# Altium integrated library ABM8-25.000MHZ-B2-T.IntLib: 1 symbol
Pins are listed as number, name and electrical type; pins without a type are passive.

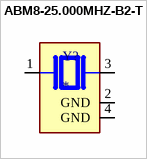
[diagram p0: symbol ABM8-25.000MHZ-B2-T]

## ABM8-25.000MHZ-B2-T
designator Y?
25 MHz Â±20ppm Crystal 18pF 50 Ohms 4-SMD, No Lead; MF: Abracon; MP: ABM8-25.000MHZ-B2-T; SnapEDA_Link: https://www.snapeda.com/parts/ABM8-25.000MHZ-B2-T/Abracon/view-part/?ref=snap; Package: NON-STANDARD-4 ABRACON; Value: *; Check_prices: https://www.snapeda.com/parts/ABM8-25.000MHZ-B2-T/Abracon/view-part/?ref=eda
footprint XTAL_ABM8-25.000MHZ-B2-T
pins: 1, 2 GND (power), 3 2, 4 GND (power)